# EAGLE library part ADM3055EBRIZ-RL (library ADM3055EBRIZ-RL)
CAN Interface IC 5kV isoPower Isolated CAN-FD Transceiver Source: Datasheet <https://www.analog.com/media/en/technical-documentation/data-sheets/ADM3055E-3057E.pdf>
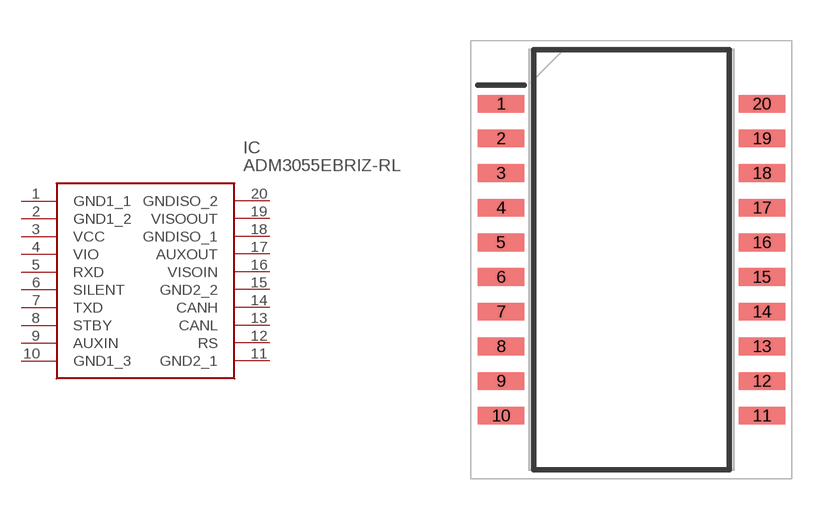
[diagram p0: symbol with the pads of SOIC127P1030X264-20N; footprint SOIC127P1030X264-20N]

Designator prefix IC

## ADM3055EBRIZ-RL (Description: CAN Interface IC 5kV isoPower Isolated CAN-FD Transceiver; Height: 2.64mm; Manufacturer_Name: Analog Devices; Manufacturer_Part_Number: ADM3055EBRIZ-RL; Mouser_Part_Number: 584-ADM3055EBRIZ-RL; Mouser_Price-Stock: https://www.mouser.co.uk/ProductDetail/Analog-Devices/ADM3055EBRIZ-RL?qs=qSfuJ%252Bfl%2Fd7r0f9T4vdNWQ%3D%3D)  [SOIC127P1030X264-20N]
1  GND1_1
2  GND1_2
3  VCC
4  VIO
5  RXD
6  SILENT
7  TXD
8  STBY
9  AUXIN
10  GND1_3
11  GND2_1
12  RS
13  CANL
14  CANH
15  GND2_2
16  VISOIN
17  AUXOUT
18  GNDISO_1
19  VISOOUT
20  GNDISO_2

## Footprint SOIC127P1030X264-20N (pad centres in mm)
[SOIC_IC]
smd 1.7 x 0.65: 1 -4.775,5.715; 2 -4.775,4.445; 3 -4.775,3.175; 4 -4.775,1.905; 5 -4.775,0.635; 6 -4.775,-0.635; 7 -4.775,-1.905; 8 -4.775,-3.175; 9 -4.775,-4.445; 10 -4.775,-5.715; 11 4.775,-5.715; 12 4.775,-4.445; 13 4.775,-3.175; 14 4.775,-1.905; 15 4.775,-0.635; 16 4.775,0.635; 17 4.775,1.905; 18 4.775,3.175; 19 4.775,4.445; 20 4.775,5.715